# EAGLE library part LAN8740AI-EN-TR (library LAN8740AI-EN-TR)
Ethernet ICs Small Footprint MII/RMII 10/100 Energy Efficient Ethernet Transceiver Source: Datasheet <https://datasheet.datasheetarchive.com/originals/distributors/DKDS-15/280025.pdf>
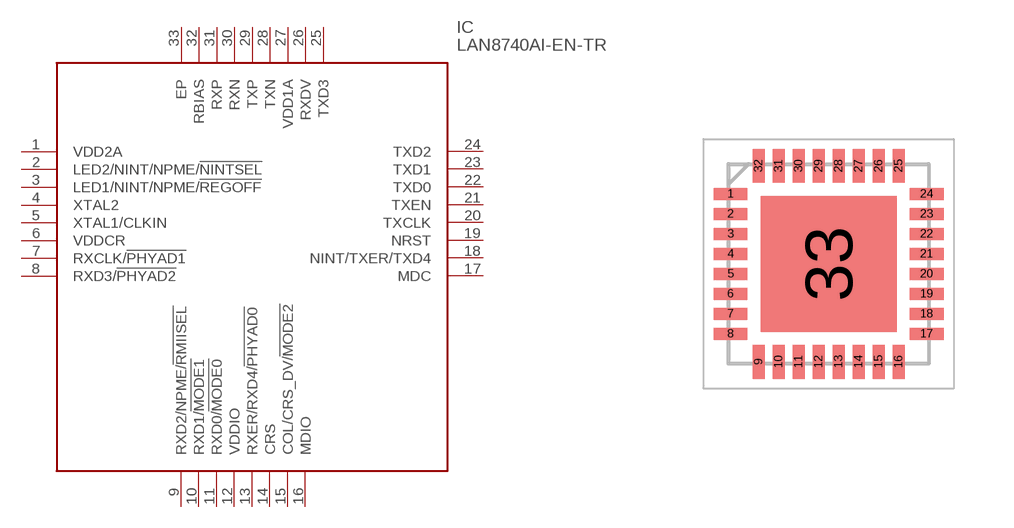
[diagram p0: symbol with the pads of QFN50P500X500X100-33N; footprint QFN50P500X500X100-33N]

Designator prefix IC

## LAN8740AI-EN-TR (Description: Ethernet ICs Small Footprint MII/RMII 10/100 Energy Efficient Ethernet Transceiver; Height: 1mm; Manufacturer_Name: Microchip; Manufacturer_Part_Number: LAN8740AI-EN-TR; Mouser_Part_Number: 579-LAN8740AI-EN-TR; Mouser_Price-Stock: https://www.mouser.co.uk/ProductDetail/Microchip-Technology/LAN8740AI-EN-TR?qs=6qKXPk0vzx1pdBrIaNrUbA%3D%3D)  [QFN50P500X500X100-33N]
1  VDD2A
2  LED2/NINT/NPME/!NINTSEL
3  LED1/NINT/NPME/!REGOFF
4  XTAL2
5  XTAL1/CLKIN
6  VDDCR
7  RXCLK/!PHYAD1
8  RXD3/!PHYAD2
9  RXD2/NPME/!RMIISEL
10  RXD1/!MODE1
11  RXD0/!MODE0
12  VDDIO
13  RXER/RXD4/!PHYAD0
14  CRS
15  COL/CRS_DV/!MODE2
16  MDIO
17  MDC
18  NINT/TXER/TXD4
19  NRST
20  TXCLK
21  TXEN
22  TXD0
23  TXD1
24  TXD2
25  TXD3
26  RXDV
27  VDD1A
28  TXN
29  TXP
30  RXN
31  RXP
32  RBIAS
33  EP

## Footprint QFN50P500X500X100-33N (pad centres in mm)
32-Lead Very Thin Plastic Quad Flat, No Lead Package
smd 0.85 x 0.3: 1 -2.45,1.75; 2 -2.45,1.25; 3 -2.45,0.75; 4 -2.45,0.25; 5 -2.45,-0.25; 6 -2.45,-0.75; 7 -2.45,-1.25; 8 -2.45,-1.75; 17 2.45,-1.75; 18 2.45,-1.25; 19 2.45,-0.75; 20 2.45,-0.25; 21 2.45,0.25; 22 2.45,0.75; 23 2.45,1.25; 24 2.45,1.75
smd 0.3 x 0.85: 9 -1.75,-2.45; 10 -1.25,-2.45; 11 -0.75,-2.45; 12 -0.25,-2.45; 13 0.25,-2.45; 14 0.75,-2.45; 15 1.25,-2.45; 16 1.75,-2.45; 25 1.75,2.45; 26 1.25,2.45; 27 0.75,2.45; 28 0.25,2.45; 29 -0.25,2.45; 30 -0.75,2.45; 31 -1.25,2.45; 32 -1.75,2.45
smd 3.4 x 3.4: 33 0,0